# Altium footprint library LimeMicroAltiumLib.PcbLib: 876 footprints (part 20 of 57)
Each footprint in its own frame and in the unit in brackets; x right, y up, seen from the top. Pads: shape width x height; smd on the part's side, far side on the other; paste and mask are expansions set on the pad; w line width, h text height; cw(c..) or ccw(c..) is an arc to the next point about the centre after c.
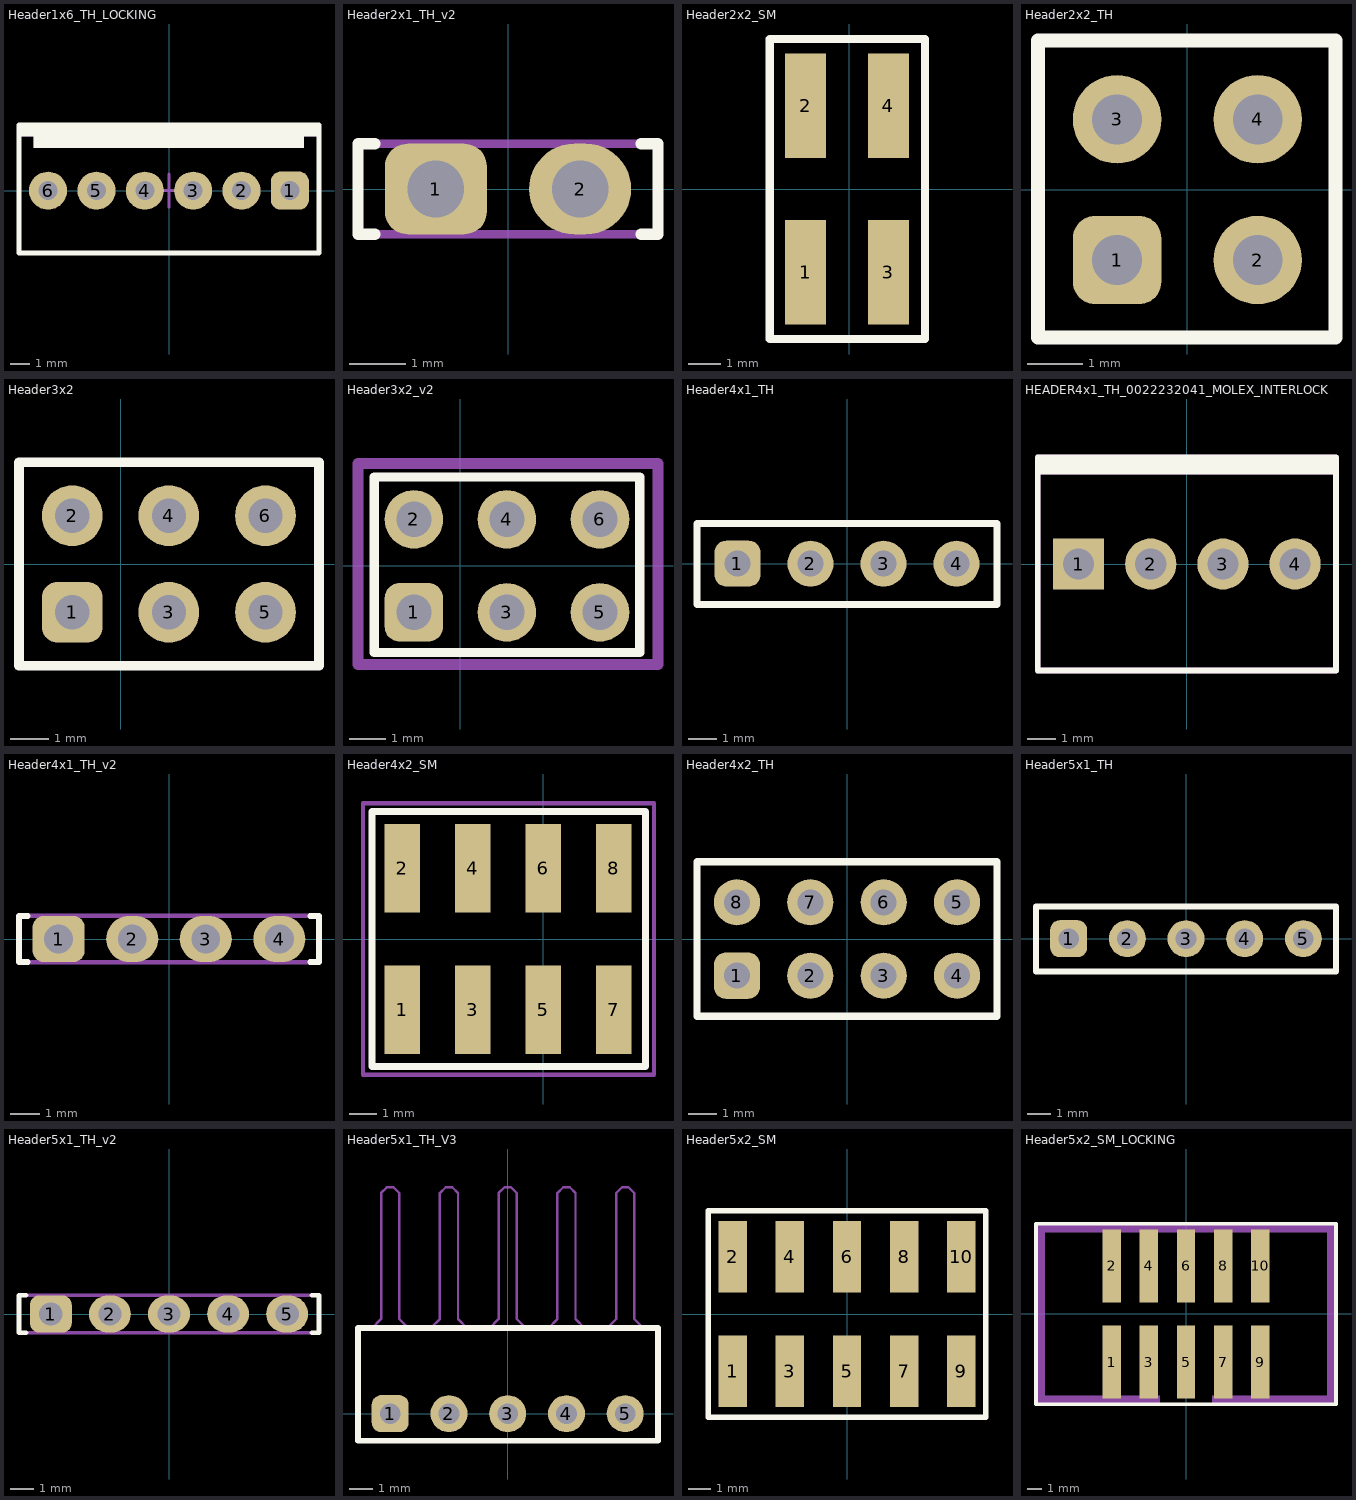
[diagram p19: the footprints below, top view; thin cyan lines are the x and y axes]

## Header1x6_TH_LOCKING [mm]
pads (6):
  rrect50% 2x2 hole 1: 1(6.357,0)
  round 2 hole 1: 2(3.814,0) 3(1.271,0) 4(-1.271,0) 5(-3.814,0) 6(-6.357,0)
Top Overlay:
  region: -7.886,3.45 -7.886,2.85 7.886,2.85 7.886,3.45
  region: 7.086,2.25 7.086,2.85 -7.104,2.85 -7.104,2.25
  lines w0.254: -7.886,-3.275 7.886,-3.275 7.886,3.45 -7.886,3.45 -7.886,-3.275
Mechanical 15:
  region: -7.886,3.45 -7.886,2.85 7.886,2.85 7.886,3.45
  region: 7.089,2.25 7.089,2.85 -7.104,2.85 -7.104,2.25
  lines w0.15: -0.875,0 0,0 ; 0,-0.875 0,0 ; 0,0.875 0,0 ; 0.875,0 0,0 ; -7.886,-3.275 7.886,-3.275 7.886,3.45 -7.886,3.45 -7.886,-3.275
  text "1" at 6.211,-1 h0.55
  text ".Designator" at 0,0 h0.55
  text "KEY" at -0.779,1.475 h0.55
3D body "022292021.stp": height 11.52, standoff -3.74, extent -2.54,-2.9 2.54,2.9
3D body "022292021.stp": height 11.52, standoff -3.74, extent -5.083,-2.9 -0.003,2.9
3D body "022292021.stp": height 11.52, standoff -3.74, extent 0.003,-2.9 5.083,2.9
3D body "022292021.stp": height 11.52, standoff -3.74, extent 2.546,-2.9 7.626,2.9
3D body "022292021.stp": height 11.52, standoff -3.74, extent -7.626,-2.9 -2.546,2.9

## Header2x1_TH_v2 [mm]
pads (2):
  rrect50% 1.8x1.6 hole 1: 1(-1.271,0)
  oval 1.8x1.6 hole 1: 2(1.271,0)
Top Overlay:
  lines w0.2: -2.343,-0.8 -2.643,-0.8 -2.643,0.8 -2.343,0.8 ; 2.343,-0.8 2.643,-0.8 2.643,0.8 2.343,0.8
Mechanical 15:
  lines w0.15: -2.643,-0.8 -2.643,0.8 2.643,0.8 2.643,-0.8 -2.643,-0.8
  text ".Designator" at 0.014,0 h0.55

## Header2x2_SM [mm]
pads (4):
  rect 1.27x3.2 smd: 1(-1.336,-2.55) 2(-1.336,2.55) 3(1.207,-2.55) 4(1.207,2.55)
Top Overlay:
  lines w0.254: -2.436,-4.6 -2.436,4.6 2.325,4.6 2.325,-4.6 -2.436,-4.6
Mechanical 15:
  lines w0.15: -2.425,-4.6 -2.425,4.575 2.325,4.575 2.325,-4.6 -2.425,-4.6
  text ".Designator" at -1.4,-0.1 h0.55
3D body "pin_header_a-sl254-dg-g04mp1.stp": height 9.7, standoff -0.04, extent -2.54,-3.7 2.54,3.8

## Header2x2_TH [mm]
pads (4):
  rrect50% 1.6x1.6 hole 0.9: 1(-1.271,-1.271)
  round 1.6 hole 0.9: 2(1.271,-1.271) 3(-1.271,1.271) 4(1.271,1.271)
Top Overlay:
  lines w0.254: -2.7,-2.675 2.675,-2.675 2.675,2.7 -2.7,2.7 -2.7,-2.675
Mechanical 15:
  lines w0.15: -2.725,-2.7 -2.725,2.725 2.675,2.725 2.675,-2.7 -2.725,-2.7
  text ".Designator" at 0,0 h0.55
3D body "65775.stp": height 8.54, standoff -3, extent 0.001,-2.541 2.541,-0.001
3D body "65775.stp": height 8.54, standoff -3, extent -2.541,-2.541 -0.001,-0.001
3D body "65775.stp": height 8.54, standoff -3, extent 0.001,0.002 2.541,2.542
3D body "65775.stp": height 8.54, standoff -3, extent -2.541,0.002 -0.001,2.542

## Header3x2 [mm]
pads (6):
  rrect50% 1.6x1.6 hole 0.9: 1(-1.271,-1.271)
  round 1.6 hole 0.9: 2(-1.271,1.271) 3(1.271,-1.271) 4(1.271,1.271) 5(3.814,-1.271) 6(3.814,1.271)
Top Overlay:
  lines w0.254: -2.675,-2.675 -2.675,2.675 5.225,2.675 5.225,-2.675 -2.675,-2.675
Mechanical 15:
  lines w0.15: -2.675,-2.675 5.225,-2.675 5.225,2.675 -2.675,2.675 -2.675,-2.675
  text ".Designator" at 0,0 h0.55
3D body "65775.stp": height 8.54, standoff -3, extent -2.541,0.002 -0.001,2.542
3D body "65775.stp": height 8.54, standoff -3, extent 0.001,0.002 2.541,2.542
3D body "65775.stp": height 8.54, standoff -3, extent 2.544,0.002 5.084,2.542
3D body "65775.stp": height 8.54, standoff -3, extent 2.544,-2.541 5.084,-0.001
3D body "65775.stp": height 8.54, standoff -3, extent 0.001,-2.541 2.541,-0.001
3D body "65775.stp": height 8.54, standoff -3, extent -2.541,-2.541 -0.001,-0.001

## Header3x2_v2 [mm]
pads (6):
  rrect50% 1.6x1.6 hole 0.965: 1(-1.271,-1.271)
  round 1.6 hole 0.965: 2(-1.271,1.271) 3(1.271,-1.271) 4(1.271,1.271) 5(3.814,-1.271) 6(3.814,1.271)
Top Overlay:
  lines w0.254: -2.357,-2.371 4.9,-2.371 4.9,2.429 -2.357,2.429 -2.357,-2.371
Mechanical 15:
  lines w0.3: -2.8,-2.7 -2.8,2.8 5.4,2.8 5.4,-2.7 -2.8,-2.7
  text ".Designator" at 0,0 h0.7
3D body "PinHeaderMating 1P.stp": height 6.78, standoff -3, extent -0.188,-2.541 2.732,-0.001
3D body "PinHeaderMating 1P.stp": height 6.78, standoff -3, extent -2.731,-2.541 0.189,-0.001
3D body "PinHeaderMating 1P.stp": height 6.78, standoff -3, extent -0.188,0.001 2.732,2.541
3D body "PinHeaderMating 1P.stp": height 6.78, standoff -3, extent -2.731,0.001 0.189,2.541

## Header4x1_TH [mm]
pads (4):
  rrect50% 1.6x1.6 hole 0.9: 1(-3.814,0)
  round 1.6 hole 0.9: 2(-1.271,0) 3(1.271,0) 4(3.814,0)
Top Overlay:
  lines w0.254: -5.225,-1.425 5.225,-1.425 5.225,1.4 -5.225,1.4 -5.225,-1.425
Mechanical 15:
  lines w0.15: -5.225,-1.425 -5.225,1.4 5.225,1.4 5.225,-1.425 -5.225,-1.425
  text ".Designator" at -0.129,0 h0.55
3D body "65775.stp": height 8.54, standoff -3, extent 2.544,-1.27 5.084,1.27
3D body "65775.stp": height 8.54, standoff -3, extent 0.001,-1.27 2.541,1.27
3D body "65775.stp": height 8.54, standoff -3, extent -2.541,-1.27 -0.001,1.27
3D body "65775.stp": height 8.54, standoff -3, extent -5.084,-1.27 -2.544,1.27

## HEADER4x1_TH_0022232041_MOLEX_INTERLOCK [mm]
pads (4):
  rect 1.8x1.8 hole 1.1: 1(-3.81,0)
  round 1.8 hole 1.1: 2(-1.27,0) 3(1.27,0) 4(3.81,0)
Top Overlay:
  region: -5.31,3.25 -5.31,3.75 5.19,3.75 5.19,3.25
  lines w0.2: -5.25,3.25 5.25,3.25 ; -5.25,-3.75 5.25,-3.75 5.25,3.75 -5.25,3.75 -5.25,-3.75
Mechanical 15:
  region: -5.25,3.25 -5.25,3.75 5.25,3.75 5.25,3.25
  lines w0.2: -5.25,3.25 5.19,3.25 ; -5.25,-3.75 5.25,-3.75 5.25,3.75 -5.25,3.75 -5.25,-3.75
  text "Interlock wall" at -3.75,2.25 h0.55
  text ".Designator" at 0,0 h0.55
3D body "022232041.stp": height 10.68, standoff -3.54, extent -5.004,-3.251 5.004,3.099

## Header4x1_TH_v2 [mm]
pads (4):
  rrect50% 1.8x1.6 hole 1: 1(-3.814,0)
  oval 1.8x1.6 hole 1: 2(-1.271,0) 3(1.271,0) 4(3.814,0)
Top Overlay:
  lines w0.2: -4.886,-0.8 -5.186,-0.8 -5.186,0.8 -4.886,0.8 ; 4.886,-0.8 5.186,-0.8 5.186,0.8 4.886,0.8
Mechanical 15:
  lines w0.15: -5.186,-0.8 -5.186,0.8 5.186,0.8 5.186,-0.8 -5.186,-0.8
  text ".Designator" at -0.025,0 h0.55

## Header4x2_SM [mm]
pads (8):
  rect 1.27x3.2 smd: 1(-5.086,-2.55) 2(-5.086,2.55) 3(-2.543,-2.55) 4(-2.543,2.55) 5(0,-2.55) 6(0,2.55) 7(2.543,-2.55) 8(2.543,2.55)
Top Overlay:
  lines w0.254: -6.186,-4.6 3.7,-4.6 3.7,4.6 -6.186,4.6 -6.186,-4.6
Mechanical 15:
  lines w0.15: -6.5,-4.9 4,-4.9 4,4.9 -6.5,4.9 -6.5,-4.9
  text ".Designator" at -1.4,-0.1 h0.55
3D body "pin_header_a-sl254-dg-g08mp1.stp": height 9.7, standoff -0.04, extent -6.38,-3.75 3.78,3.75

## Header4x2_TH [mm]
pads (8):
  rrect50% 1.6x1.6 hole 0.9: 1(-3.814,-1.271)
  round 1.6 hole 0.9: 2(-1.271,-1.271) 3(1.271,-1.271) 4(3.814,-1.271) 5(3.814,1.271) 6(1.271,1.271) 7(-1.271,1.271) 8(-3.814,1.271)
Top Overlay:
  lines w0.254: -5.2,-2.675 5.2,-2.675 5.2,2.675 -5.2,2.675 -5.2,-2.675
Mechanical 15:
  lines w0.15: -5.2,-2.675 -5.2,2.675 5.2,2.675 5.2,-2.675 -5.2,-2.675
  text ".Designator" at 0,0 h0.55
3D body "65775.stp": height 8.54, standoff -3, extent -5.084,0.002 -2.544,2.542
3D body "65775.stp": height 8.54, standoff -3, extent -2.541,0.002 -0.001,2.542
3D body "65775.stp": height 8.54, standoff -3, extent 0.001,0.002 2.541,2.542
3D body "65775.stp": height 8.54, standoff -3, extent 2.544,0.002 5.084,2.542
3D body "65775.stp": height 8.54, standoff -3, extent 2.544,-2.541 5.084,-0.001
3D body "65775.stp": height 8.54, standoff -3, extent 0.001,-2.541 2.541,-0.001
3D body "65775.stp": height 8.54, standoff -3, extent -2.541,-2.541 -0.001,-0.001
3D body "65775.stp": height 8.54, standoff -3, extent -5.084,-2.541 -2.544,-0.001

## Header5x1_TH [mm]
pads (5):
  rrect50% 1.6x1.6 hole 0.9: 1(-5.086,0)
  round 1.6 hole 0.9: 2(-2.543,0) 3(0,0) 4(2.543,0) 5(5.086,0)
Top Overlay:
  lines w0.254: -6.5,-1.425 -6.5,1.4 6.5,1.4 6.5,-1.425 -6.5,-1.425
Mechanical 15:
  lines w0.15: -6.5,-1.425 6.5,-1.425 6.5,1.4 -6.5,1.4 -6.5,-1.425
  text ".Designator" at 0,0 h0.55
3D body "65775.stp": height 8.54, standoff -3, extent -6.356,-1.27 -3.816,1.27
3D body "65775.stp": height 8.54, standoff -3, extent -3.813,-1.27 -1.273,1.27
3D body "65775.stp": height 8.54, standoff -3, extent -1.27,-1.27 1.27,1.27
3D body "65775.stp": height 8.54, standoff -3, extent 1.273,-1.27 3.813,1.27
3D body "65775.stp": height 8.54, standoff -3, extent 3.816,-1.27 6.356,1.27

## Header5x1_TH_v2 [mm]
pads (5):
  rrect50% 1.8x1.6 hole 1: 1(-5.086,0)
  oval 1.8x1.6 hole 1: 2(-2.543,0) 3(0,0) 4(2.543,0) 5(5.086,0)
Top Overlay:
  lines w0.2: -6.157,-0.8 -6.457,-0.8 -6.457,0.8 -6.157,0.8 ; 6.157,-0.8 6.457,-0.8 6.457,0.8 6.157,0.8
Mechanical 15:
  lines w0.15: -6.457,-0.8 6.457,-0.8 6.457,0.8 -6.457,0.8 -6.457,-0.8
  text ".Designator" at 0,0 h0.55

## Header5x1_TH_V3 [mm]
pads (5):
  rrect50% 1.6x1.6 hole 0.9: 1(-5.086,0)
  round 1.6 hole 0.9: 2(-2.543,0) 3(0,0) 4(2.543,0) 5(5.086,0)
Top Overlay:
  lines w0.254: -6.479,-1.175 -6.479,3.7 6.504,3.7 6.504,-1.175 -6.479,-1.175
Mechanical 15:
  lines w0.1: -5.879,3.7 -5.479,4.1 -5.479,9.55 -5.229,9.8 -4.943,9.8 -4.693,9.55 -4.693,4.1 -4.293,3.7 ; -3.336,3.7 -2.936,4.1 -2.936,9.55 -2.686,9.8 -2.4,9.8 -2.15,9.55 -2.15,4.1 -1.75,3.7 ; -0.793,3.7 -0.393,4.1 -0.393,9.55 -0.143,9.8 0.143,9.8 0.393,9.55 0.393,4.1 0.793,3.7 ; 1.75,3.7 2.15,4.1 2.15,9.55 2.4,9.8 2.686,9.8 2.936,9.55 2.936,4.1 3.336,3.7 ; 4.293,3.7 4.693,4.1 4.693,9.55 4.943,9.8 5.229,9.8 5.479,9.55 5.479,4.1 5.879,3.7
  lines w0.15: -6.479,-1.175 6.504,-1.175 6.504,3.7 -6.479,3.7 -6.479,-1.175
  text ".Designator" at 0,0 h0.55
3D body "User Library-Header_Male_RA_Low_1Pin.STEP": height 2.51, standoff -3, extent -6.356,-0.32 -3.816,9.81
3D body "User Library-Header_Male_RA_Low_1Pin.STEP": height 2.51, standoff -3, extent -3.813,-0.32 -1.273,9.81
3D body "User Library-Header_Male_RA_Low_1Pin.STEP": height 2.51, standoff -3, extent -1.27,-0.32 1.27,9.81
3D body "User Library-Header_Male_RA_Low_1Pin.STEP": height 2.51, standoff -3, extent 1.273,-0.32 3.813,9.81
3D body "User Library-Header_Male_RA_Low_1Pin.STEP": height 2.51, standoff -3, extent 3.816,-0.32 6.356,9.81

## Header5x2_SM [mm]
pads (10):
  rect 1.27x3.2 smd: 1(-5.086,-2.55) 2(-5.086,2.55) 3(-2.543,-2.55) 4(-2.543,2.55) 5(0,-2.55) 6(0,2.55) 7(2.543,-2.55) 8(2.543,2.55) 9(5.086,-2.55) 10(5.086,2.55)
Top Overlay:
  lines w0.254: -6.186,-4.6 -6.186,4.6 6.189,4.6 6.189,-4.6 -6.186,-4.6
Mechanical 15:
  lines w0.15: -6.2,-4.6 6.2,-4.6 6.2,4.6 -6.2,4.6 -6.2,-4.6
  text ".Designator" at 0,0 h0.55
3D body "pin_header_a-sl254-dg-g10mp1.stp": height 9.7, standoff -0.04, extent -6.35,-3.75 6.35,3.75

## Header5x2_SM_LOCKING [mm]
pads (10):
  rect 1.27x5 smd: 1(-5.086,-3.3) 2(-5.086,3.3) 3(-2.543,-3.3) 4(-2.543,3.3) 5(0,-3.3) 6(0,3.3) 7(2.543,-3.3) 8(2.543,3.3) 9(5.086,-3.3) 10(5.086,3.3)
Top Overlay:
  lines w0.254: -10.3,-6.2 -10.3,6.2 10.3,6.2 10.3,-6.2 -10.3,-6.2
Mechanical 15:
  region: 10.3,6.2 9.7,6.2 9.7,-6.2 10.3,-6.2
  region: -9.7,6.2 -10.3,6.2 -10.3,-6.2 -9.7,-6.2
  region: 1.8,-6.2 1.8,-5.6 10.296,-5.6 10.296,-6.2
  region: -10.3,6.2 -10.3,5.6 10.3,5.6 10.3,6.2
  region: -1.8,-6.2 -1.8,-5.6 -10.296,-5.6 -10.296,-6.2
  lines w0.15: -10.3,-6.2 10.3,-6.2 10.3,6.2 -10.3,6.2 -10.3,-6.2
  text "1" at -5.1,-3.5 h0.55
  text ".Designator" at 0,0 h0.55
3D body "SBH11-_ _ _C-D05-SM-_ _.STEP": height 10.63, standoff 0.01, extent -10.1,-5.15 10.1,5.15